# Altium footprint library AG9905MTB.PcbLib: 1 footprints
Each footprint in its own frame and in the unit in brackets; x right, y up, seen from the top. Pads: shape width x height; smd on the part's side, far side on the other; paste and mask are expansions set on the pad; w line width, h text height; cw(c..) or ccw(c..) is an arc to the next point about the centre after c.
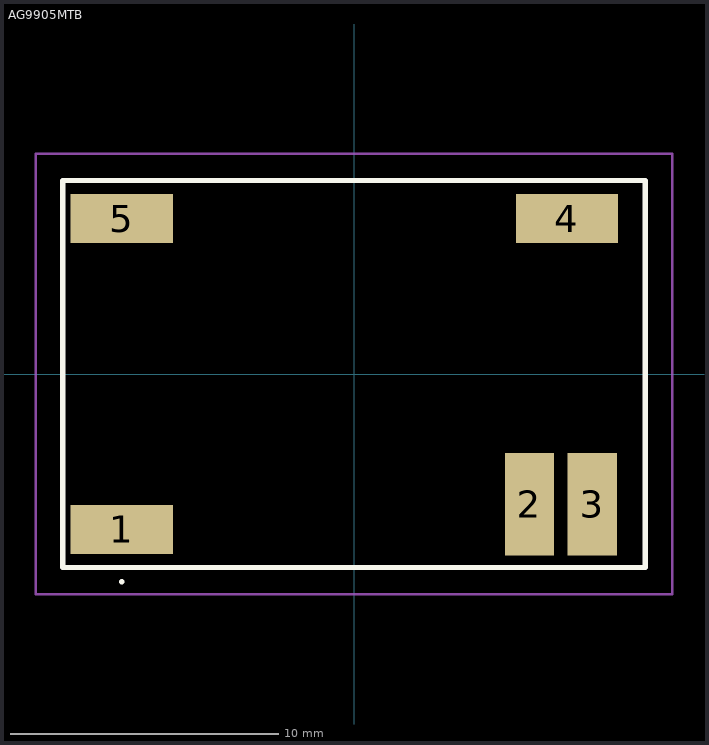
[diagram p0: the footprint, top view; thin cyan lines are the x and y axes]

## AG9905MTB [mm]
pads (5):
  rect 3.81x1.83 smd: 1(-8.655,-5.79) 4(7.935,5.79) 5(-8.655,5.79)
  rect 1.83x3.81 smd: 2(6.535,-4.85) 3(8.875,-4.85)
Top Overlay:
  lines w0.1: -8.655,-7.79 -8.655,-7.79 ; -8.655,-7.79 ccw(c-8.655,-7.74) -8.655,-7.69 ; -8.655,-7.79 cw(c-8.655,-7.74) -8.655,-7.69 ; -8.655,-7.69 -8.655,-7.69
  lines w0.2: -10.855,-7.21 10.855,-7.21 10.855,7.21 -10.855,7.21 -10.855,-7.21
Mechanical 15:
  lines w0.1: -10.855,-7.21 10.855,-7.21 10.855,7.21 -10.855,7.21 -10.855,-7.21
Mechanical 20:
  lines w0.1: -11.855,-8.21 11.855,-8.21 11.855,8.21 -11.855,8.21 -11.855,-8.21